# Altium schematic symbol library BSZ086P03NS3 G.SchLib: 1 symbol
Pins are listed as number, name and electrical type; pins without a type are passive.

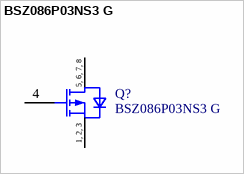
[diagram p0: symbol BSZ086P03NS3 G]

## BSZ086P03NS3 G
designator Q?
Insulated-Gate Field-Effect Transistor (IGFET), P-Channel, Enhancement, Body Diode, Pin 1 Source, 2 Source, 3 Source, 4 Gate, 5 Drain, 6 Drain, 7 Drain, 8 Drain, 8 Pins; Manufacturer: Infineon Technologies; Manufacturer Order Number: BSZ086P03NS3 G; PackageReference: PG-DSO-8-902
pins: 1 SOURCE, 2 SOURCE, 3 SOURCE, 4 Gate, 5 DRAIN, 6 DRAIN, 7 DRAIN, 8 DRAIN
text: 5, 6, 7, 8; 1, 2, 3